# Altium footprint library FootPrintLib_0.PcbLib: 266 footprints (part 8 of 17)
Each footprint in its own frame and in the unit in brackets; x right, y up, seen from the top. Pads: shape width x height; smd on the part's side, far side on the other; paste and mask are expansions set on the pad; w line width, h text height; cw(c..) or ccw(c..) is an arc to the next point about the centre after c.
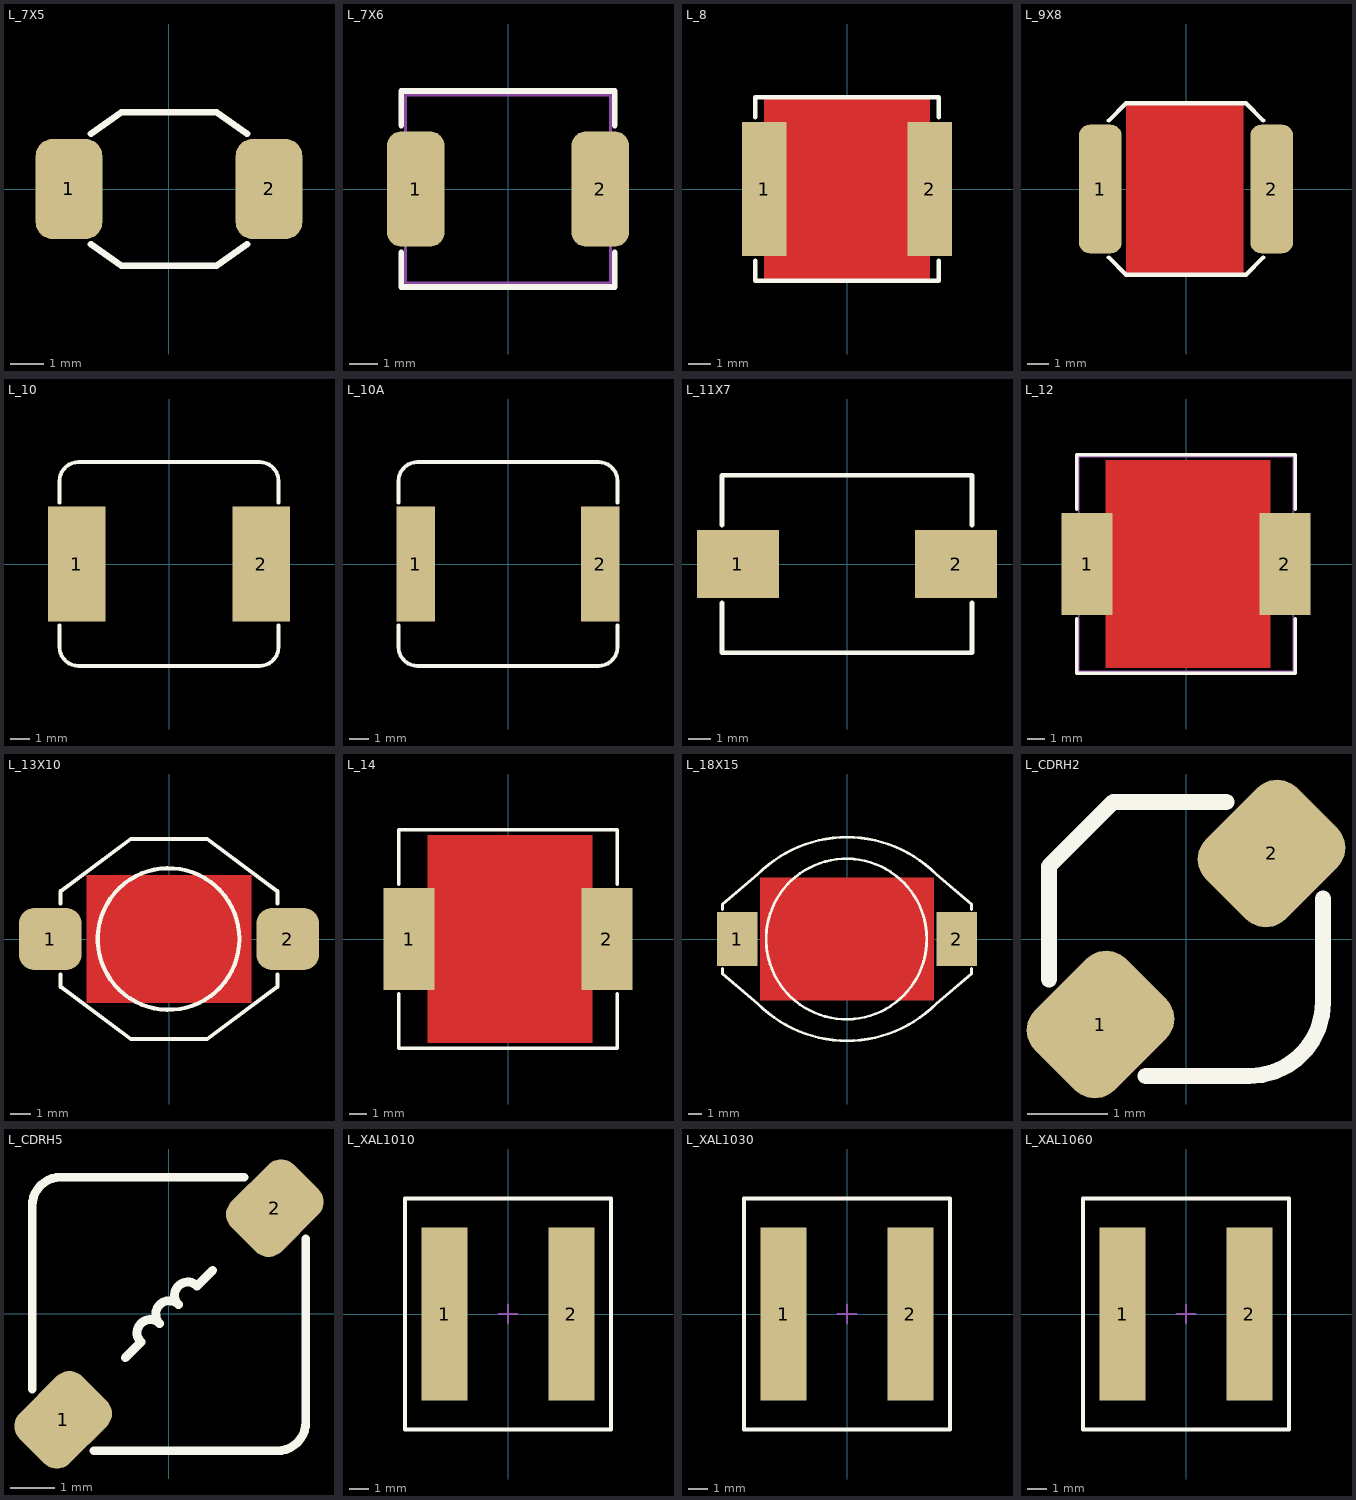
[diagram p7: the footprints below, top view; thin cyan lines are the x and y axes]

## L_7X5 [mm] "INDUCTOR, 6.6X4.4X3mm, SDE6603"
pads (2):
  rrect50% 2x3 smd: 1(-3,0) 2(3,0)
Top Overlay:
  lines w0.2: -2.342,-1.66 -1.429,-2.3 1.429,-2.3 2.342,-1.66 ; -2.342,1.66 -1.429,2.3 1.429,2.3 2.342,1.66
3D body "User Library-SDE6603_ws.STEP": height 2.91, standoff 0, extent -3.3,-2.225 3.3,2.225

## L_7X6 [mm] "Precision Wire Wound Inductor, 2-Leads, Body 7.5x6.5x3mm, IPC Medium Density"
height 3
pads (2):
  rrect50% 2x4 smd: 1(-3.2,0) 2(3.2,0)
Top Overlay:
  lines w0.2: -3.7,-2.2 -3.7,-3.4 3.7,-3.4 3.7,-2.2 ; -3.7,2.2 -3.7,3.4 3.7,3.4 3.7,2.2
Mechanical 13:
  lines w0.1: -3.55,-3.25 -3.55,3.25 3.55,3.25 3.55,-3.25 -3.55,-3.25
3D body: height 3, standoff 0, extent -3.55,-3.25 3.55,3.25

## L_8 [mm] "INDUCTOR, 7.5X7.5mm, 8x8, DR74"
height 4.5
pads (2):
  rect 2x6 smd: 1(-3.7,0) 2(3.7,0)
Top Layer:
  pour cut-out: -3.7,4.1 -3.7,-4.1 3.7,-4.1 3.7,4.1
Top Overlay:
  lines w0.2: -4.1,-3.2 -4.1,-4.1 4.1,-4.1 4.1,-3.2 ; -4.1,3.2 -4.1,4.1 4.1,4.1 4.1,3.2
3D body "Cooper Bussman DR73 Series Inductor.STEP": height 3.55, standoff 0, extent -3.8,-3.8 3.8,3.8

## L_9X8 [mm] "INDUCTOR, 9X7.7X1.6mm 2700 SERIES MURATA"
pads (2):
  rrect50% 2x6 smd: 1(-4,0) 2(4,0)
Top Layer:
  pour cut-out: -2.794,4.064 2.667,4.064 2.667,-4.064 -2.794,-4.064
Top Overlay:
  lines w0.2: -3.6,-3.2 -2.8,-4 2.8,-4 3.6,-3.2 ; -3.6,3.2 -2.8,4 2.8,4 3.6,3.2
3D body: height 1.6, standoff 0, extent -3.7,-3.9 3.7,3.9
3D body: height 1.6, standoff 0, extent -4.5,-2.9 -3.7,2.9
3D body: height 1.6, standoff 0, extent 3.7,-2.9 4.5,2.9

## L_10 [mm] "INDUCTOR, 10.5X11.5mm, CDRH104R, MSS1038 (coilcraft)"
height 4
pads (2):
  rect 3x6 smd: 1(-4.8,0) 2(4.8,0)
Top Overlay:
  lines w0.2: -5.7,-3.2 -5.7,-4.3 ccw(c-4.7,-4.3) -4.7,-5.3 4.7,-5.3 ccw(c4.7,-4.3) 5.7,-4.3 5.7,-3.2 ; -5.7,3.2 -5.7,4.3 cw(c-4.7,4.3) -4.7,5.3 4.7,5.3 cw(c4.7,4.3) 5.7,4.3 5.7,3.2
3D body "MPC1040LR45C.step": height 4.01, standoff 0, extent -5.75,-5.15 5.75,5.15

## L_10A [mm] "INDUCTOR, 10.5X11.5mm, CDRH104R, MSS1038 (coilcraft)"
height 4
pads (2):
  rect 2x6 smd: 1(-4.8,0) 2(4.8,0)
Top Overlay:
  lines w0.2: -5.7,-3.2 -5.7,-4.3 ccw(c-4.7,-4.3) -4.7,-5.3 4.7,-5.3 ccw(c4.7,-4.3) 5.7,-4.3 5.7,-3.2 ; -5.7,3.2 -5.7,4.3 cw(c-4.7,4.3) -4.7,5.3 4.7,5.3 cw(c4.7,4.3) 5.7,4.3 5.7,3.2
3D body "MPC1040LR45C.step": height 4.01, standoff 0, extent -5.75,-5.15 5.75,5.15

## L_11X7 [mm] "INDUCTOR, 7.5X10.8X7.2mm, SLC1175"
height 7.2
pads (2):
  rect 3.6x3 smd: 1(-4.8,0) 2(4.8,0)
Top Overlay:
  lines w0.2: -5.5,-1.7 -5.5,-3.9 5.5,-3.9 5.5,-1.7 ; -5.5,1.7 -5.5,3.9 5.5,3.9 5.5,1.7
3D body "Coilcraft-SLC1175.step": height 7.25, standoff 0, extent -5.6,-3.825 5.6,3.825

## L_12 [mm] "INDUCTOR, 13.5x12.5mm, DR125, CDRH127, D128C 931AS"
height 7
pads (2):
  rect 3x6 smd: 1(-5.8,0) 2(5.8,0)
Top Layer:
  pour cut-out: -4.699,6.096 4.953,6.096 4.953,-6.096 -4.699,-6.096
Top Overlay:
  lines w0.2: -6.4,-3.2 -6.4,-6.4 6.4,-6.4 6.4,-3.2 ; -6.4,3.2 -6.4,6.4 6.4,6.4 6.4,3.2
Mechanical 13:
  lines w0.1: -6.3,-6.3 -6.3,6.3 6.3,6.3 6.3,-6.3 -6.3,-6.3
3D body "User Library-D128C.step": height 8.16, standoff 0, extent -6.158,-6.15 6.158,6.15

## L_13X10 [mm] "INDUCTOR, 13X9.5mm, 12.7X10mm"
pads (2):
  rrect50% 3x3 smd: 1(-5.7,0) 2(5.7,0)
Top Layer:
  pour cut-out: 3.937,3.048 -3.937,3.048 -3.937,-3.048 3.937,-3.048
Top Overlay:
  circle w0.2: c-0.021,0 r3.4
  lines w0.2: -5.2,-1.7 -5.2,-2.293 -1.832,-4.8 1.832,-4.8 5.2,-2.293 5.2,-1.7 ; -5.2,1.7 -5.2,2.293 -1.832,4.8 1.832,4.8 5.2,2.293 5.2,1.7
3D body "Pulse Inductor RR.STEP": height 4.38, standoff 0, extent -6.487,-4.699 6.482,4.699

## L_14 [mm] "INDUCTOR, 13.5x12.5mm, DR125, CDRH127, D128C 931AS"
height 7
pads (2):
  rect 3x6 smd: 1(-5.8,0) 2(5.8,0)
Top Layer:
  pour cut-out: -4.699,6.096 4.953,6.096 4.953,-6.096 -4.699,-6.096
Top Overlay:
  lines w0.2: -6.4,-3.2 -6.4,-6.4 6.4,-6.4 6.4,-3.2 ; -6.4,3.2 -6.4,6.4 6.4,6.4 6.4,3.2
3D body "User Library-SRP1270_2RMR.step": height 7, standoff 0, extent -6.85,-6.847 6.85,6.847

## L_18X15 [mm] "INDUCTOR, 18.5X15.24mm"
pads (2):
  rect 3x4 smd: 1(-8.2,0) 2(8.2,0)
Top Layer:
  pour cut-out: 6.477,4.572 6.477,-4.572 -6.477,-4.572 -6.477,4.572
Top Overlay:
  circle w0.2: c-0.044,0 r6
  lines w0.2: -9.3,-2.2 -9.3,-2.593 -6.647,-4.847 ccw(c0,1.8) 6.647,-4.847 9.3,-2.593 9.3,-2.2 ; -9.3,2.2 -9.3,2.593 -6.647,4.847 cw(c0,-1.8) 6.647,4.847 9.3,2.593 9.3,2.2
3D body: height 7.2, standoff 0, extent -6,-5.998 6,5.999
3D body: height 2, standoff 0, extent -9.2,-7.5 9.2,0
3D body: height 2, standoff 0, extent 7,-1.1 9.2,1.1
3D body: height 2, standoff 0, extent -9.2,-1.1 -7,1.1
3D body: height 2, standoff 0, extent -9.2,0 9.2,7.5

## L_CDRH2 [mm] "CDRH2D18, 3.2x3.2x2.0mm"
pads (2):
  rrect50% 1.4x1.6 smd rot 135: 1(-1.061,-1.061) 2(1.061,1.061)
Top Overlay:
  lines w0.2: -1.7,-0.5 -1.7,0.9 -0.9,1.7 0.5,1.7 ; -0.5,-1.7 0.784,-1.7 ccw(c0.784,-0.784) 1.7,-0.784 1.7,0.5
3D body "User Library-CDRH2D18-1.step": height 2.05, standoff 0, extent -1.6,-1.6 1.6,1.6

## L_CDRH5 [mm] "INDUCTOR, 6X6X2mm, CDRH5D18"
height 1.8
pads (2):
  rrect50% 1.6x2 smd rot 135 mask+0.1: 1(-2.4,-2.4) 2(2.4,2.4)
Top Overlay:
  lines w0.2: -3.1,-1.7 -3.1,2.455 cw(c-2.455,2.455) -2.455,3.1 1.7,3.1 ; -1.7,-3.1 2.455,-3.1 ccw(c2.455,-2.455) 3.1,-2.455 3.1,1.7 ; -0.99,-0.99 -0.636,-0.636 cw(c-0.424,-0.424) -0.212,-0.212 cw(c0,0) 0.212,0.212 cw(c0.424,0.424) 0.636,0.636 0.99,0.99
3D body "User Library-CDRH5D18.STEP": height 2, standoff 0, extent -3,-3 3,3.005

## L_XAL1010 [mm] "Inductor, XAL1010, 10.50x11.3x10mm"
height 10
pads (2):
  rect 2.4x9 smd: 1(-3.3,0) 2(3.3,0)
Top Overlay:
  lines w0.2: -5.35,-6 5.35,-6 5.35,6 -5.35,6 -5.35,-6
Mechanical 13:
  lines w0.1: -0.5,0 0.5,0 ; 0,-0.5 0,0.5
3D body "Coilcraft-XAL1010.step": height 10, standoff 0, extent -5.25,-5.9 5.25,5.9

## L_XAL1030 [mm] "Inductor, XAL1030, 10.50x11.3x3.1mm"
height 3.1
pads (2):
  rect 2.4x9 smd: 1(-3.3,0) 2(3.3,0)
Top Overlay:
  lines w0.2: -5.35,-6 5.35,-6 5.35,6 -5.35,6 -5.35,-6
Mechanical 13:
  lines w0.1: -0.5,0 0.5,0 ; 0,-0.5 0,0.5
3D body "Coilcraft-XAL1030.step": height 3.1, standoff 0, extent -5.25,-5.9 5.25,5.9

## L_XAL1060 [mm] "Inductor, XAL1060, 10.50x11.3x6.0mm"
height 6
pads (2):
  rect 2.4x9 smd: 1(-3.3,0) 2(3.3,0)
Top Overlay:
  lines w0.2: -5.35,-6 5.35,-6 5.35,6 -5.35,6 -5.35,-6
Mechanical 13:
  lines w0.1: -0.5,0 0.5,0 ; 0,-0.5 0,0.5
3D body "Coilcraft-XAL1060.step": height 6, standoff 0, extent -5.25,-5.9 5.25,5.9